# Altium footprint library Main_Power_Uint_Pcb_Library.PcbLib: 28 footprints (part 2 of 2)
Each footprint in its own frame and in the unit in brackets; x right, y up, seen from the top. Pads: shape width x height; smd on the part's side, far side on the other; paste and mask are expansions set on the pad; w line width, h text height; cw(c..) or ccw(c..) is an arc to the next point about the centre after c.
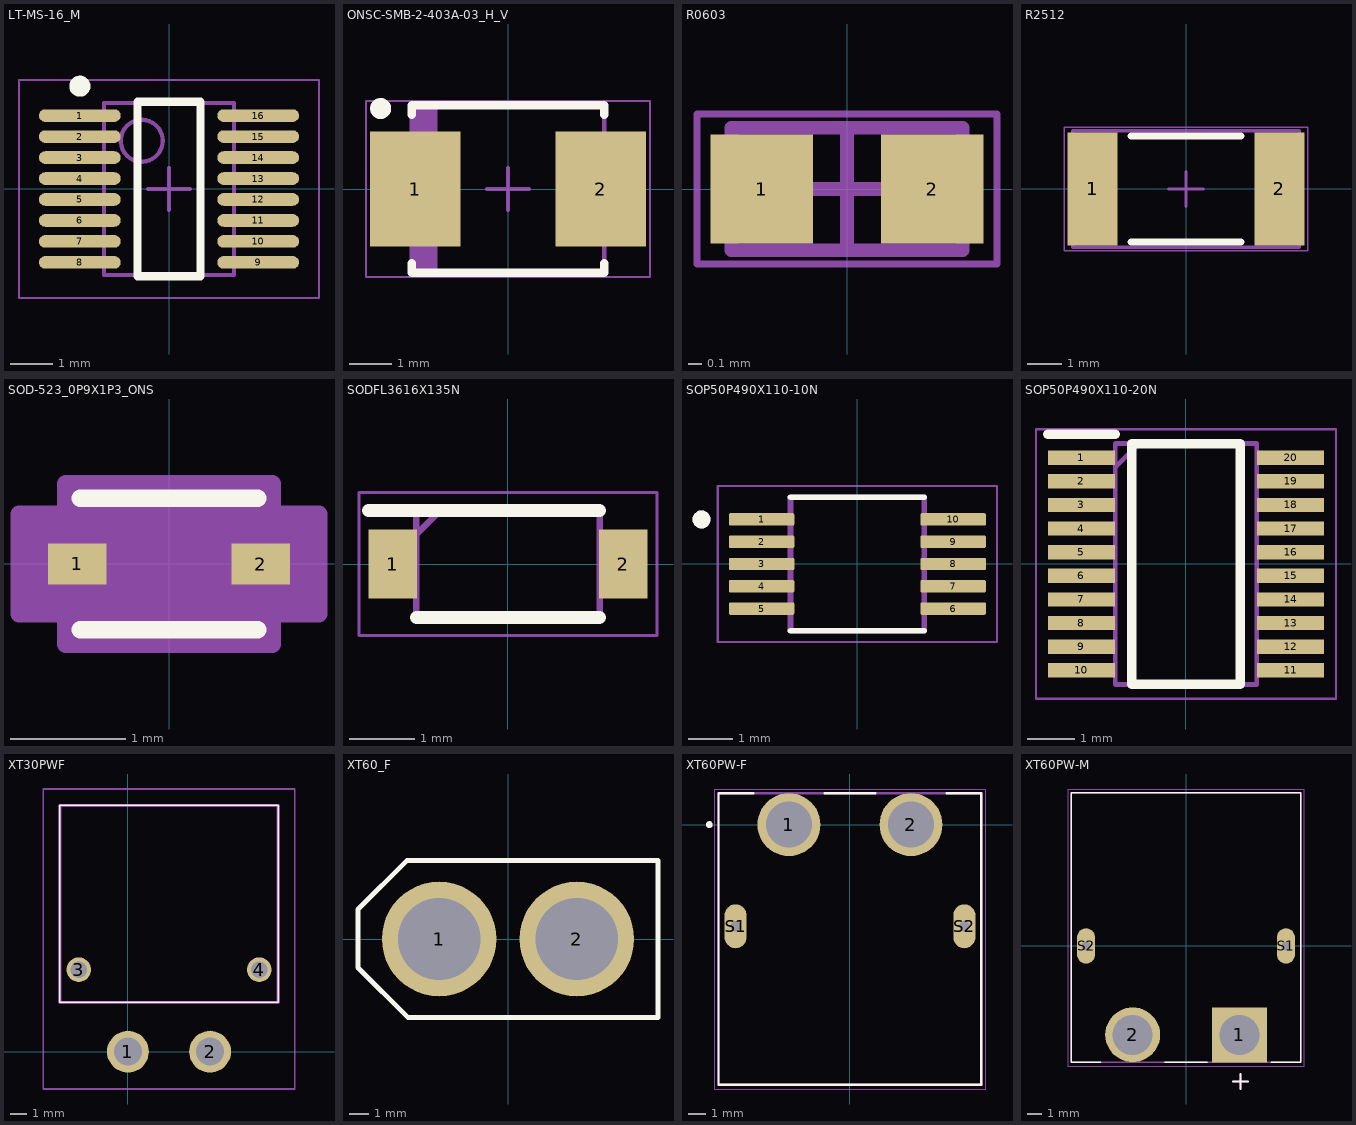
[diagram p1: the footprints below, top view; thin cyan lines are the x and y axes]

## LT-MS-16_M [mm] "SOP, 16-Leads, Body 4.1x3.1mm, Pitch 0.5mm, IPC Low Density"
height 1.1
pads (16):
  oval 1.95x0.3 smd: 1(-2.125,1.75) 2(-2.125,1.25) 3(-2.125,0.75) 4(-2.125,0.25) 5(-2.125,-0.25) 6(-2.125,-0.75) 7(-2.125,-1.25) 8(-2.125,-1.75) 9(2.125,-1.75) 10(2.125,-1.25) 11(2.125,-0.75) 12(2.125,-0.25) 13(2.125,0.25) 14(2.125,0.75) 15(2.125,1.25) 16(2.125,1.75)
Top Overlay:
  circle w0.25: c-2.125,2.45 r0.125
  lines w0.2: -0.75,-2.075 -0.75,2.075 0.75,2.075 0.75,-2.075 -0.75,-2.075
Top 3D Body:
  circle w0.1: c-0.65,1.15 r0.5
  lines w0.1: -1.55,-2.05 -1.55,2.05 1.55,2.05 1.55,-2.05 -1.55,-2.05
Top Courtyard:
  lines w0.05: -3.575,-2.6 -3.575,2.6 3.575,2.6 3.575,-2.6 -3.575,-2.6
  lines w0.1: -0.5,0 0.5,0 ; 0,-0.5 0,0.5
3D body: height 1.1, standoff 0.05, extent -1.55,-2.05 1.55,2.05

## ONSC-SMB-2-403A-03_H_V [mm] "Molded, 2-Leads, Body 4.6x3.95mm"
height 2.42
pads (2):
  rect 2.159x2.743 smd: 1(-2.21,0) 2(2.21,0)
Top Overlay:
  circle w0.25: c-3.039,1.921 r0.125
  lines w0.2: -2.3,-1.772 -2.3,-2 2.3,-2 2.3,-1.772 ; -2.3,1.772 -2.3,2 2.3,2 2.3,1.772
Top 3D Body:
  rectangle: -2.3,-1.975 -1.681,1.975
  lines w0.1: -2.3,-1.975 -2.3,1.975 2.3,1.975 2.3,-1.975 -2.3,-1.975
Top Courtyard:
  lines w0.05: -3.39,-2.1 -3.39,2.1 3.389,2.1 3.39,-2.1 -3.39,-2.1
  lines w0.1: -0.5,0 0.5,0 ; 0,-0.5 0,0.5
3D body: height 2.42, standoff 0, extent -2.3,-1.975 2.3,1.975

## R0603 [mm]
height 0.55
pads (2):
  rect 0.75x0.8 smd: 1(-0.625,0) 2(0.625,0)
Top 3D Body:
  lines w0.1: -0.85,-0.45 -0.85,0.45 0.85,0.45 0.85,-0.45 -0.85,-0.45
Top Courtyard:
  lines w0.05: -1.1,-0.55 -1.1,0.55 1.1,0.55 1.1,-0.55 -1.1,-0.55
  lines w0.1: -0.45,0 0.45,0 ; 0,-0.45 0,0.45
3D body "Resistor_0603.step": height 0.46, standoff 0.01, extent -0.8,-0.4 0.8,0.4

## R2512 [mm]
height 1.1
pads (2):
  rect 1.45x3.3 smd: 1(-2.725,0) 2(2.725,0)
Top Overlay:
  lines w0.2: -1.6,-1.55 1.6,-1.55 ; -1.6,1.55 1.6,1.55
Top Assembly:
  lines w0.1: -3.3,-1.7 -3.3,1.7 3.3,1.7 3.3,-1.7 -3.3,-1.7
Top Courtyard:
  lines w0.05: -3.55,-1.8 -3.55,1.8 3.55,1.8 3.55,-1.8 -3.55,-1.8
  lines w0.1: -0.5,0 0.5,0 ; 0,-0.5 0,0.5
3D body "Resistor_2512.step": height 0.66, standoff 0.01, extent -3.15,-1.6 3.15,1.6

## SOD-523_0P9X1P3_ONS [mil]
pads (2):
  rect 20x14 smd paste+0 mask+0: 1(-31.5,0) 2(31.5,0)
Top Overlay:
  lines w6: -30.5,-22.5 30.5,-22.5 ; -30.5,22.5 30.5,22.5
Top 3D Body:
  lines w1: -25.5,-8.75 -16.75,-17.5 ; -25.5,8.75 -16.75,17.5 ; -33.5,-7 -25.5,-7 -25.5,7 -33.5,7 -33.5,-7 ; -25.5,-17.5 -25.5,17.5 25.5,17.5 25.5,-17.5 -25.5,-17.5 ; 25.5,-7 33.5,-7 33.5,7 25.5,7 25.5,-7
Top Courtyard:
  region: -35.5,-17 -51.5,-17 -51.5,17 -35.5,17 -35.5,27.5 35.5,27.5 35.5,17 51.5,17 51.5,-17 35.5,-17 35.5,-27.5 -35.5,-27.5
  lines w6: -51.5,-17 -35.5,-17 -35.5,-27.5 35.5,-27.5 35.5,-17 51.5,-17 51.5,17 35.5,17 35.5,27.5 -35.5,27.5 -35.5,17 -51.5,17 -51.5,-17
3D body "SOD-523_0P9X1P3_ONS.step": height 18.27, standoff 0, extent -33.5,-17.48 33.5,17.48

## SODFL3616X135N [mm]
pads (2):
  rect 0.74x1.07 smd: 1(-1.775,0) 2(1.775,0)
Top Overlay:
  lines w0.2: -2.145,0.825 1.412,0.825 ; -1.412,-0.825 1.412,-0.825
Top 3D Body:
  lines w0.1: -1.412,0.455 -1.042,0.825 ; -1.412,-0.825 -1.412,0.825 1.412,0.825 1.412,-0.825 -1.412,-0.825
Top Courtyard:
  lines w0.05: -2.295,-1.1 -2.295,1.1 2.295,1.1 2.295,-1.1 -2.295,-1.1
3D body "SMD110PL-TP.stp": height 1.2, standoff 0, extent -1.798,-0.8 1.802,0.8

## SOP50P490X110-10N [mm]
height 1.1
pads (10):
  rrect25% 1.47x0.28 smd: 1(-2.15,1) 2(-2.15,0.5) 3(-2.15,0) 4(-2.15,-0.5) 5(-2.15,-1) 6(2.15,-1) 7(2.15,-0.5) 8(2.15,0) 9(2.15,0.5) 10(2.15,1)
Top Overlay:
  circle w0.2: c-3.5,1 r0.1
  lines w0.127: -1.5,-1.5 1.5,-1.5 ; -1.5,1.5 1.5,1.5
Top 3D Body:
  circle w0.2: c-3.5,1 r0.1
  lines w0.127: -1.5,-1.5 1.5,-1.5 1.5,1.5 -1.5,1.5 -1.5,-1.5
Top Courtyard:
  lines w0.05: -3.135,-1.75 3.135,-1.75 3.135,1.75 -3.135,1.75 -3.135,-1.75
3D body "step_temp.STEP": height 1.1, standoff 0, extent -2.45,-1.5 2.45,1.5

## SOP50P490X110-20N [mm]
height 0.65
pads (20):
  rect 1.425x0.3 smd: 1(-2.212,2.25) 2(-2.212,1.75) 3(-2.212,1.25) 4(-2.212,0.75) 5(-2.212,0.25) 6(-2.212,-0.25) 7(-2.212,-0.75) 8(-2.212,-1.25) 9(-2.212,-1.75) 10(-2.212,-2.25) 11(2.212,-2.25) 12(2.212,-1.75) 13(2.212,-1.25) 14(2.212,-0.75) 15(2.212,-0.25) 16(2.212,0.25) 17(2.212,0.75) 18(2.212,1.25) 19(2.212,1.75) 20(2.212,2.25)
Top Overlay:
  lines w0.2: -2.925,2.75 -1.5,2.75 ; -1.15,-2.55 1.15,-2.55 1.15,2.55 -1.15,2.55 -1.15,-2.55
Top 3D Body:
  lines w0.1: -1.5,2.05 -1,2.55 ; -1.5,-2.55 1.5,-2.55 1.5,2.55 -1.5,2.55 -1.5,-2.55
Top Courtyard:
  lines w0.05: -3.175,-2.85 3.175,-2.85 3.175,2.85 -3.175,2.85 -3.175,-2.85
3D body "TPS48111-Q1.stp": height 1.1, standoff 0, extent -2.45,-2.55 2.45,2.55

## XT30PWF [mm]
height 0.55
pads (4):
  round 2.55 hole 1.7: 1(0,0) 2(5,0)
  round 1.5 hole 1: 3(-3,5) 4(8,5)
Top Overlay:
  lines w0.1: -4.15,3 -4.15,15 9.15,15 9.15,3 -4.15,3
Top 3D Body:
  lines w0.2: -4.15,3 -4.15,15 9.15,15 9.15,3 -4.15,3
Top Courtyard:
  lines w0.1: -5.15,-2.275 -5.15,16 10.15,16 10.15,-2.275 -5.15,-2.275
3D body "XT30PW-F.stp": height 5.21, standoff -1.97, extent -4.15,-0.965 9.15,13.93

## XT60_F [mm]
height 0.55
pads (2):
  round 6 hole 4.3: 1(-3.6,0) 2(3.6,0)
Top Overlay:
  lines w0.254: -7.85,-1.5 -7.85,1.55 -5.3,4.1 7.85,4.1 7.85,-4.1 -5.25,-4.1 -7.85,-1.5
3D body "XT60 Buchse.stp": height 16.8, standoff -5, extent -7.8,-4 7.8,4

## XT60PW-F [mm]
height 8.4
pads (4):
  round 3.716 hole 2.7: 1(-3.6,0) 2(3.6,0)
  oval 1.3x2.6 hole 0.6 square: S1(-6.75,-6) S2(6.75,-6)
Top Overlay:
  circle w0.2: c-8.3,0 r0.1
  lines w0.127: -5.71,1.85 -7.75,1.85 -7.75,-15.35 7.75,-15.35 7.75,1.85 5.71,1.85 ; -1.49,1.85 1.49,1.85
Top 3D Body:
  circle w0.2: c-8.3,0 r0.1
  lines w0.127: -7.75,-15.35 -7.75,1.85 7.75,1.85 7.75,-15.35 -7.75,-15.35
Top Courtyard:
  lines w0.05: -8,-15.6 -8,2.1 8,2.1 8,-15.6 -8,-15.6
3D body "step_temp.STEP": height 8.4, standoff -2.55, extent -7.75,-15.35 7.75,1.85

## XT60PW-M [mm]
height 8.4
pads (4):
  rect 3.716x3.716 / inner round 3.716 / far side rect 3.716x3.716 hole 2.7: 1(3.6,-6)
  round 3.716 hole 2.7: 2(-3.6,-6)
  oval 1.2x2.4 hole 0.6 square: S1(6.75,0) S2(-6.75,0)
Top Overlay:
  lines w0.127: -5.778,-7.85 -7.75,-7.85 -7.75,10.35 7.75,10.35 7.75,-7.85 5.778,-7.85 ; -1.422,-7.85 1.422,-7.85 ; 3.172,-9.153 3.672,-9.153 ; 3.68,-9.661 3.68,-9.161 ; 3.68,-8.653 3.68,-9.153 4.18,-9.153
Top 3D Body:
  lines w0.127: 3.172,-9.153 3.672,-9.153 ; 3.68,-9.661 3.68,-9.161 ; 3.68,-8.653 3.68,-9.153 4.18,-9.153 ; -7.75,-7.85 -7.75,10.35 7.75,10.35 7.75,-7.85 -7.75,-7.85
Top Courtyard:
  lines w0.05: -8,-8.11 -8,10.6 8,10.6 8,-8.11 -8,-8.11
3D body "step_temp.STEP": height 8.4, standoff -2.55, extent -7.75,-7.85 7.75,10.35